# Altium integrated library pca20057.IntLib: 8 symbols
Pins are listed as number, name and electrical type; pins without a type are passive.

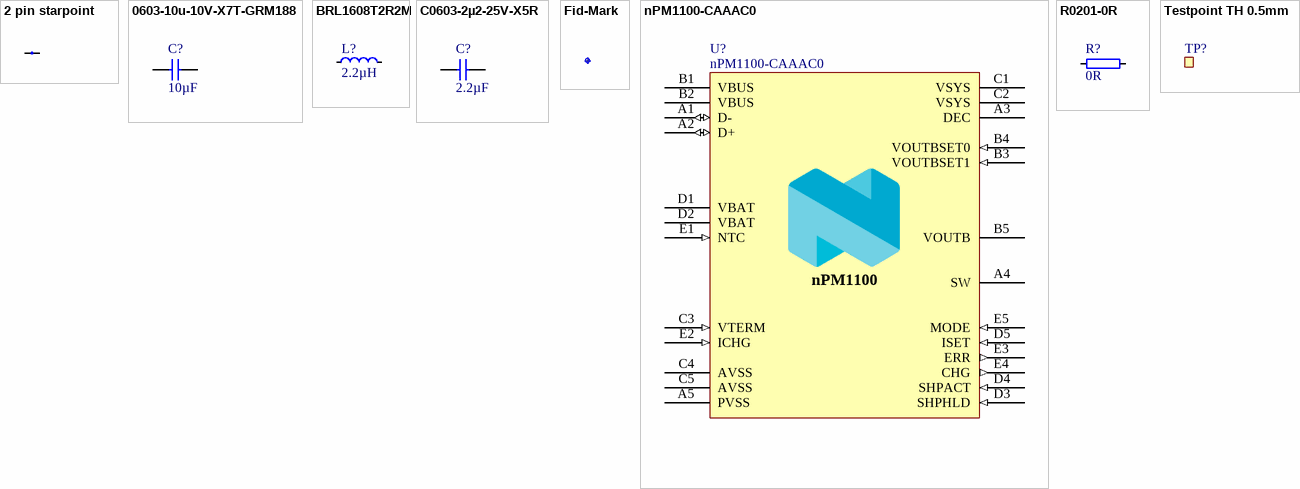
[diagram p0: symbols 2 pin starpoint to Testpoint TH 0.5mm]

## 2 pin starpoint
designator J?, comment N.A.  (value not drawn)  (net tie, no BOM)
Starpoint; Part Number: 2 pin starpoint; Pad Count: 2; Manufacturer: N.A.; Manufacturer Part Number: N.A.; ComponentLink1URL: N.A.; ComponentLink1Description: Datasheet; ComponentLink2URL: N.A.; ComponentLink2Description: Supplier link; HelpURL: N.A.; Footprint Doc: N.A.; LatestRevisionDate: 2017-08-31; Pin Count: 2; Publisher: Nordic Semiconductor; Published: 2017-08-31; Value: N.A.; Note: N.A.; Supplier 1: N.A.; Supplier Part Number 1: N.A.; Supplier 2: N.A.; Supplier Part Number 2: N.A.; Artikkelnr Noca: N.A.; Part number IPS: N.A.; Component Class: Connectors; PartId: 100500603
footprint 2 PIN STARPOINT
pins: 1, 2

## 0603-10u-10V-X7T-GRM188
designator C?, comment 10µF
CAP CER 10UF 10V X7T 0603; Part Number: 0603-10u-10V-X7T-GRM188; Manufacturer: Murata; Manufacturer Part Number: GRM188D71A106MA73; Part number IPS: 00000004696; Note: 10VDC; Artikkelnr Noca: N.A.; Pad Count: 2; ComponentLink1URL: N.A.; ComponentLink1Description: Datasheet; ComponentLink2URL: N.A.; ComponentLink2Description: Supplier link; HelpURL: https://no.mouser.com/datasheet/2/281/murata_03052018_GRM_Series_1-1310166.pdf; Footprint Doc: 0603; LatestRevisionDate: 2020-10-13; Publisher: Nordic Semiconductor; Published: 2018-09-11; Value: 10µF; Supplier 1: Digi-Key; Supplier Part Number 1: 490-7200-1-ND; Supplier 2: Mouser; Supplier Part Number 2: 81-GRM188D71A106MA3D; Component Class: Capacitors; PartId: 100200414
footprint CAPC1608X06L
pins: 1, 2

## BRL1608T2R2M
designator L?, comment 2.2µH
FIXED IND 2.2UH 500MA 520 MOHM; Part Number: BRL1608T2R2M; Manufacturer: Taiyo Yuden; Pad Count: 2; Note: -40°C ~ 105°C; Artikkelnr Noca: N.A.; Component Class: Inductors; Manufacturer Part Number: BRL1608T2R2M; ComponentLink1URL: N.A.; ComponentLink1Description: Datasheet; ComponentLink2URL: http://ds.yuden.co.jp/TYCOMPAS/or/detail.do?productNo=BRL1608T2R2M&dataUnit=M; ComponentLink2Description: Supplier link; HelpURL: N.A.; Footprint Doc: 0603; LatestRevisionDate: 2018-04-18; Published: 2018-04-18; Value: 2.2µH; Supplier 1: Digi-Key; Supplier Part Number 1: 587-2899-1-ND; Supplier 2: N.A.; Supplier Part Number 2: N.A.; Part number IPS: N.A.; PartId: 100300091
footprint INDC1608X06L
pins: 1, 2

## C0603-2µ2-25V-X5R
designator C?, comment 2.2µF
Capacitor, Ceramic, X5R, ±10%, 25V; Part Number: C0603-2µ2-25V-X5R; Manufacturer: Murata; Manufacturer Part Number: GRM188R61E225KA12D; Pad Count: 2; Artikkelnr Noca: N.A.; PartId: 100200454; Component Class: Capacitors; Author: rsk; ComponentLink1URL: https://search.murata.co.jp/Ceramy/image/img/A01X/G101/ENG/GRM188R61E225KA12-01.pdf; ComponentLink1Description: Datasheet; ComponentLink2URL: https://www.murata.com/en-global/products/productdetail?partno=GRM188R61E225KA12%23; ComponentLink2Description: Supplier link; HelpURL: N.A.; Footprint Doc: 0603; LatestRevisionDate: 2020-12-16; Published: 2020-12-16; Value: 2.2µF; Note: 25V; Supplier 1: Digi-Key; Supplier Part Number 1: 490-10731-1-ND; Supplier 2: Mouser; Supplier Part Number 2: 81-GRM188R61E225KA2D; Part number IPS: N.A.; Part number Norautron: N.A.
footprint CAPC1608X06L
pins: 1, 2

## Fid-Mark
designator Fid?, comment Fiducial mark  (value not drawn)
Part Number: Fid-Mark; Artikkelnr Noca: N.A.; Pad Count: 1; Manufacturer: *; Manufacturer Part Number: *; LatestRevisionDate: 2009-12-12; Publisher: Nordic Semiconductor; Published: 2009-12-12; Value: *; Note: *; Footprint Doc: Fiducial; Part number IPS: N.A.; ComponentLink1URL: *; ComponentLink1Description: Datasheet; ComponentLink2URL: *; ComponentLink2Description: Supplier link; HelpURL: *; Supplier 1: *; Supplier Part Number 1: *; Supplier 2: *; Supplier Part Number 2: *; PartId: 100500073; Component Class: Connectors
footprint Fiducial

## nPM1100-CAAAC0
designator U?
Li-Ion/Li-Polymer USB battery charger with a high efficiency buck regulator; Manufacturer: Nordic Semiconductor; Note: N.A.; Pad Count: 25; Part Number: nPM1100-CAAAC0; Manufacturer Part Number: nPM1100-CAAAC0; ComponentLink1URL: N.A.; ComponentLink1Description: Datasheet; ComponentLink2URL: N.A.; ComponentLink2Description: Supplier link; HelpURL: N.A.; Footprint Doc: WLCSP-25; LatestRevisionDate: 2021-04-21; Published: 2021-04-21; Value: nPM1100-CAAAC0; Supplier 1: Nordic Semiconductor; Supplier Part Number 1: N.A.; Supplier 2: N.A.; Supplier Part Number 2: N.A.; Artikkelnr Noca: N.A.; Part number IPS: N.A.; Component Class: nRF_Devices; PartId: 102000225; Author: rubr; Part number Norautron: N.A.
footprint BGA25C40P5X5_200X200X50
pins: A1 D- (io), A2 D+ (io), A3 DEC (power), A4 SW (power), A5 PVSS (power), B1 VBUS (power), B2 VBUS (power), B3 VOUTBSET1 (in), B4 VOUTBSET0 (in), B5 VOUTB (power), C1 VSYS (power), C2 VSYS (power), C3 VTERM (in), C4 AVSS (power), C5 AVSS (power), D1 VBAT (power), D2 VBAT (power), D3 SHPHLD (in), D4 SHPACT (in), D5 ISET (in), E1 NTC (in), E2 ICHG (in), E3 ERR (out), E4 CHG (out), E5 MODE (in)
text: nPM1100

## R0201-0R
designator R?, comment 0R
Resistor, ±5%, 0.05W; Part Number: R0201-0R; Manufacturer: N.A.; Part number IPS: 00000003245; Pad Count: 2; Note: Chip Res 5%; PartId: 100100001; Component Class: Resistors; Manufacturer Part Number: N.A.; ComponentLink1URL: N.A.; ComponentLink1Description: Datasheet; ComponentLink2URL: N.A.; ComponentLink2Description: Supplier link; HelpURL: N.A.; Footprint Doc: 0201; LatestRevisionDate: 2017-11-09; Published: 2014-11-13; Value: 0R; Supplier 1: N.A.; Supplier Part Number 1: N.A.; Supplier 2: N.A.; Supplier Part Number 2: N.A.; Artikkelnr Noca: N.A.
footprint RESC0603X03L_C
pins: 1, 2

## Testpoint TH 0.5mm
designator TP?, comment TP  (value not drawn)  (no BOM)
Testpoint, through hole; Part Number: Testpoint TH 0.5mm; Manufacturer: N.A.; Pad Count: 1; Manufacturer Part Number: N.A.; LatestRevisionDate: 2016-04-22; Published: 2016-04-22; Value: TP; Note: N.A.; Artikkelnr Noca: N.A.; Footprint Doc: N.A.; Part number IPS: N.A.; ComponentLink1URL: N.A.; ComponentLink1Description: Datasheet; ComponentLink2URL: N.A.; ComponentLink2Description: Supplier link; HelpURL: N.A.; Supplier 1: N.A.; Supplier Part Number 1: N.A.; Supplier 2: N.A.; Supplier Part Number 2: N.A.; Component Class: Connectors; PartId: 100500558
footprint TESTPAD-TH - 0.5mm
pins: 1